# Altium footprint library MPM3620AGQV-Z.PcbLib: 1 footprints
Each footprint in its own frame and in the unit in brackets; x right, y up, seen from the top. Pads: shape width x height; smd on the part's side, far side on the other; paste and mask are expansions set on the pad; w line width, h text height; cw(c..) or ccw(c..) is an arc to the next point about the centre after c.
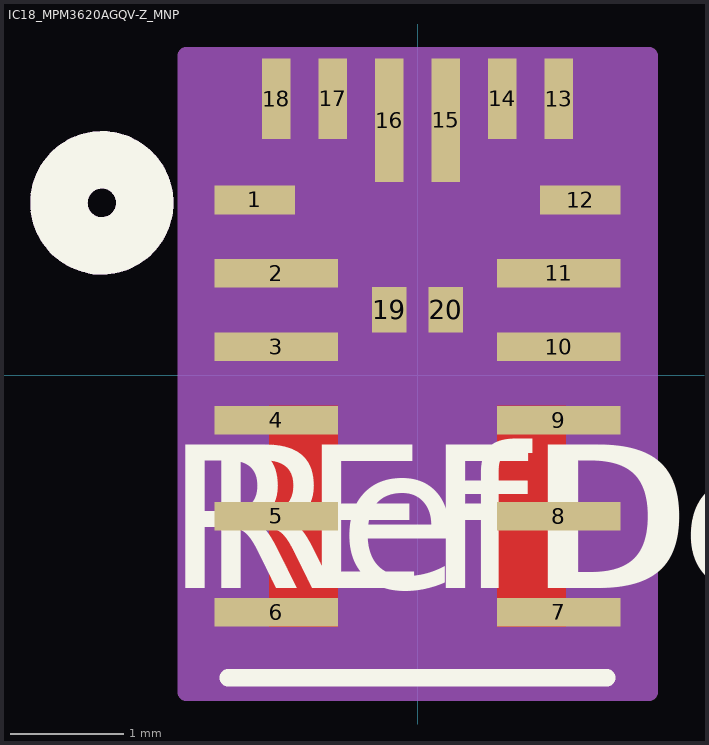
[diagram p0: the footprint, top view; thin cyan lines are the x and y axes]

## IC18_MPM3620AGQV-Z_MNP [mil]
pads (20):
  rect 28x10 smd paste+0 mask+0: 1(-56.71,61.02) 12(56.72,61.02)
  rect 43x10 smd paste-21.5 mask-21.5: 2(-49.22,35.43) 3(-49.22,9.84) 10(49.22,9.84) 11(49.22,35.43)
  rect 43x10 smd paste+0 mask+0: 4(-49.21,-15.75) 5(-49.21,-49.21) 6(-49.21,-82.68) 7(49.21,-82.68) 8(49.21,-49.21) 9(49.21,-15.75)
  rect 10x28 smd paste+0 mask+0: 13(49.21,96.24) 14(29.53,96.24) 17(-29.53,96.24) 18(-49.21,96.24)
  rect 10x43 smd paste+0 mask+0: 15(9.84,88.74) 16(-9.84,88.74)
  rect 12x16 smd paste-8 mask-8: 19(-9.84,22.76) 20(9.84,22.76)
Top Layer:
  region: -51.72,-10.71 -51.72,-87.71 -27.72,-87.71 -27.72,-10.71
  region: 27.72,-87.71 27.71,-10.75 51.72,-10.71 51.72,-87.71
Top Overlay:
  circle w20: c-110,60 r15
  lines w6: -66,-105.5 66,-105.5
  text "RefDes" at -75,-74.21 h50
  text "REFDES" at -87.5,-74.21 h50
Bottom Overlay:
  circle w20: c-110,60 r15
Top Paste:
  region: -51.72,-10.71 -51.72,-87.71 -27.72,-87.71 -27.72,-10.71
  region: 27.72,-87.71 27.71,-10.75 51.72,-10.71 51.72,-87.71
Top Solder:
  region: -51.72,-10.71 -51.72,-87.71 -27.72,-87.71 -27.72,-10.71
  region: 27.72,-87.71 27.71,-10.75 51.72,-10.71 51.72,-87.71
Mechanical 13:
  circle w20: c-110,60 r15
  lines w1: -61,-100.5 61,-100.5 61,100.5 -61,100.5 -61,-100.5
  text "RefDes2" at -87.5,-74.21 h50
Mechanical 15:
  region: 80.72,111.24 -80.71,111.24 -80.71,-110.5 80.72,-110.5
  lines w6: -80.71,-110.5 -80.71,111.24 80.72,111.24 80.72,-110.5 -80.71,-110.5